# Altium schematic symbol library 10164227-1001A1RLF.SchLib: 1 symbol
Pins are listed as number, name and electrical type; pins without a type are passive.

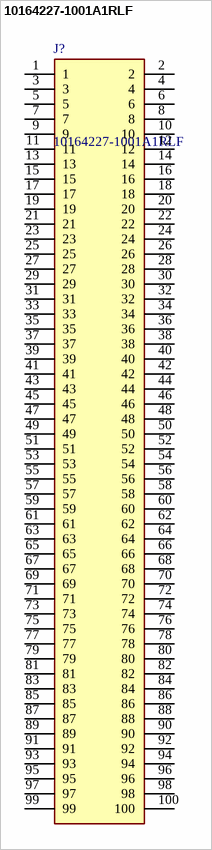
[diagram p0: symbol 10164227-1001A1RLF]

## 10164227-1001A1RLF
designator J?
BergStak 0.40mm, 100 Positions, Receptacle, 1.5mm Stack Height; Manufacturer_Name: Amphenol; Geometry.Height: 1.65mm; Manufacturer_Part_Number: 10164227-1001A1RLF; Mouser Part Number: 649-01642271001A1RLF; Mouser Price/Stock: https://www.mouser.co.uk/ProductDetail/Amphenol-FCI/10164227-1001A1RLF?qs=MyNHzdoqoQIc%2Fqhi8q%2FTOw%3D%3D; Arrow Part Number: 10164227-1001A1RLF; Arrow Price/Stock: https://www.arrow.com/en/products/10164227-1001a1rlf/amphenol-fci?utm_currency=USD&region=nac; Datasheet Link: https://www.amphenol-cs.com/product/101642271001a1rlf.html
footprint 101642271001A1RLF
pins: 1, 2, 3, 4, 5, 6, 7, 8, 9, 10, 11, 12, 13, 14, 15, 16, 17, 18, 19, 20, 21, 22, 23, 24, 25, 26, 27, 28, 29, 30, 31, 32, 33, 34, 35, 36, 37, 38, 39, 40, 41, 42, 43, 44, 45, 46, 47, 48, 49, 50, 51, 52, 53, 54, 55, 56, 57, 58, 59, 60, 61, 62, 63, 64, 65, 66, 67, 68, 69, 70, 71, 72, 73, 74, 75, 76, 77, 78, 79, 80, 81, 82, 83, 84, 85, 86, 87, 88, 89, 90, 91, 92, 93, 94, 95, 96, 97, 98, 99, 100